# Altium schematic symbol library TPS54233DR.SchLib: 1 symbol
Pins are listed as number, name and electrical type; pins without a type are passive.

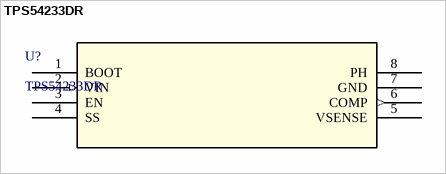
[diagram p0: symbol TPS54233DR]

## TPS54233DR
designator U?
3.5 to 28V Input, 2A, 300kHz Step-Down Converter with Eco-mode 8-SOIC -40 to 150; Manufacturer_Name: Texas Instruments; Copyright: Copyright (C) 2026 Ultra Librarian. All rights reserved.; Manufacturer_Part_Number: TPS54233DR; Datasheet: https://www.ti.com/lit/gpn/tps54233; RefDes: RefDes; Type: Type
footprint D8
pins: 1 BOOT, 2 VIN (in), 3 EN, 4 SS, 5 VSENSE, 6 COMP (out), 7 GND (power), 8 PH